# Altium footprint library WR-BHD.PcbLib: 220 footprints (part 3 of 14)
Each footprint in its own frame and in the unit in brackets; x right, y up, seen from the top. Pads: shape width x height; smd on the part's side, far side on the other; paste and mask are expansions set on the pad; w line width, h text height; cw(c..) or ccw(c..) is an arc to the next point about the centre after c.
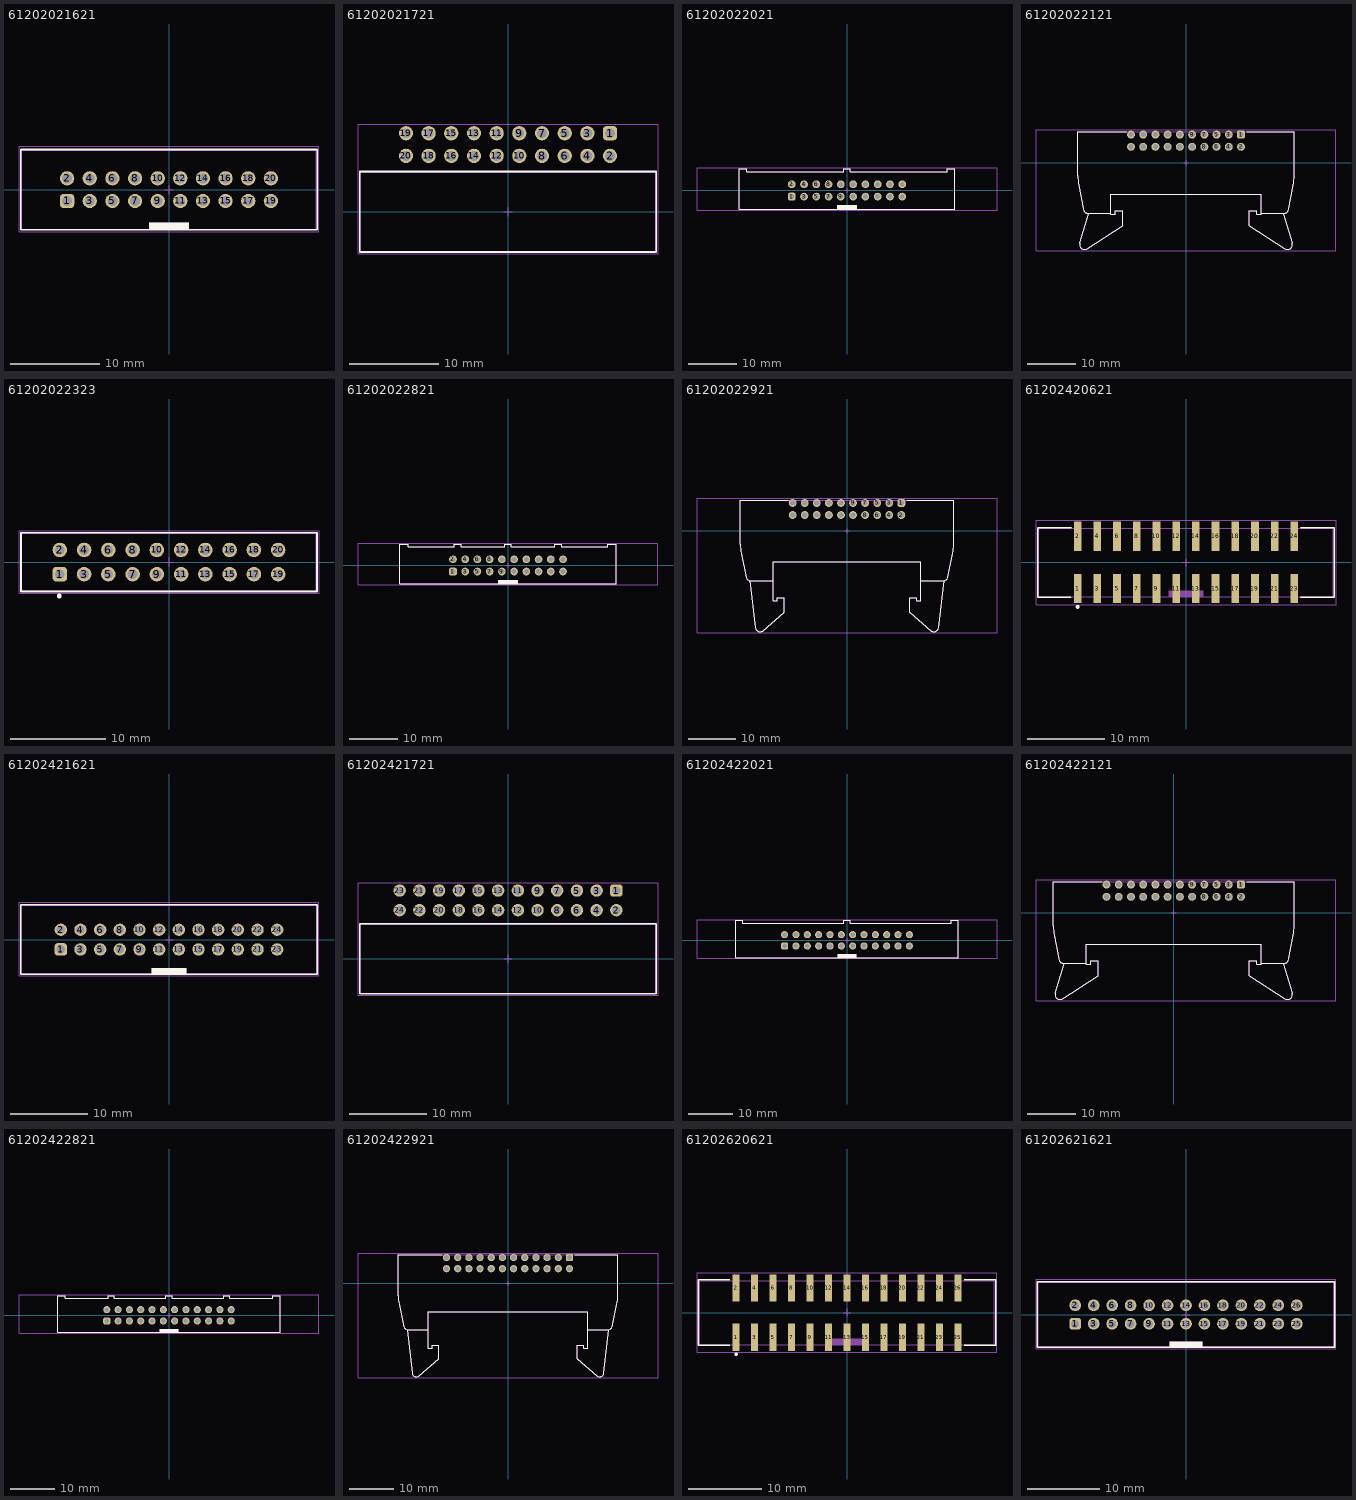
[diagram p2: the footprints below, top view; thin cyan lines are the x and y axes]

## 61202021621 [mm] "20 pins, straight, gold plating"
height 9.1
pads (20):
  rrect50% 1.6x1.6 hole 1.1: 1(-11.43,-1.27)
  round 1.6 hole 1.1: 2(-11.43,1.27) 3(-8.89,-1.27) 4(-8.89,1.27) 5(-6.35,-1.27) 6(-6.35,1.27) 7(-3.81,-1.27) 8(-3.81,1.27) 9(-1.27,-1.27) 10(-1.27,1.27) 11(1.27,-1.27) 12(1.27,1.27) 13(3.81,-1.27) 14(3.81,1.27) 15(6.35,-1.27) 16(6.35,1.27) 17(8.89,-1.27) 18(8.89,1.27) 19(11.43,-1.27) 20(11.43,1.27)
Top Overlay:
  rectangle: -2.25,-4.5 2.25,-3.7
  lines w0.2: -16.63,-4.5 -16.63,4.5 16.63,4.5 16.63,-4.5 -16.63,-4.5
Top Assembly:
  rectangle: -2.25,-4.425 2.25,-3.7
  lines w0.1: -16.53,-4.425 16.53,-4.425 16.53,4.425 -16.53,4.425 -16.53,-4.425
Top Designator:
  text ".Designator" at -3.647,-0.357 h1
Top 3D Body:
  rectangle: -2.25,-4.425 2.25,-3.7
  lines w0.1: -16.53,-4.425 -16.53,4.425 16.53,4.425 16.53,-4.425 -16.53,-4.425
Top Courtyard:
  lines w0.05: -16.83,-4.7 -16.83,4.85 16.83,4.85 16.83,-4.7 -16.83,-4.7
Top Component Center:
  lines w0.1: -0.5,0 0.5,0 ; 0,-0.5 0,0.5
3D body "61202021621.stp": height 9.13, standoff -2.98, extent -16.53,-4.425 16.53,4.75

## 61202021721 [mm] "20 pins, right angled, gold plating"
height 9.1
pads (20):
  rrect50% 1.6x1.6 hole 1.1: 1(11.43,8.805)
  round 1.6 hole 1.1: 2(11.43,6.265) 3(8.89,8.805) 4(8.89,6.265) 5(6.35,8.805) 6(6.35,6.265) 7(3.81,8.805) 8(3.81,6.265) 9(1.27,8.805) 10(1.27,6.265) 11(-1.27,8.805) 12(-1.27,6.265) 13(-3.81,8.805) 14(-3.81,6.265) 15(-6.35,8.805) 16(-6.35,6.265) 17(-8.89,8.805) 18(-8.89,6.265) 19(-11.43,8.805) 20(-11.43,6.265)
Top Overlay:
  lines w0.2: -16.605,-4.5 16.605,-4.5 16.605,4.5 -16.605,4.5 -16.605,-4.5
Top Assembly:
  lines w0.1: -16.53,-4.425 16.53,-4.425 16.53,4.425 -16.53,4.425 -16.53,-4.425
Top Designator:
  text ".Designator" at -3.647,-0.357 h1
Top 3D Body:
  lines w0.1: -16.53,-4.425 -16.53,4.425 16.53,4.425 16.53,-4.425 -16.53,-4.425
Top Courtyard:
  lines w0.05: -16.805,-4.7 -16.805,9.805 16.805,9.805 16.805,-4.7 -16.805,-4.7
Top Component Center:
  lines w0.1: -0.5,0 0.5,0 ; 0,-0.5 0,0.5
3D body "61202021721.stp": height 9.23, standoff -2.88, extent -16.53,-4.425 16.53,9.125

## 61202022021 [mm] "20 pins, straight, short lever, gold plating"
height 24.5
pads (20):
  rrect50% 1.6x1.6 hole 1.02: 1(-11.43,-1.27)
  round 1.6 hole 1.02: 2(-11.43,1.27) 3(-8.89,-1.27) 4(-8.89,1.27) 5(-6.35,-1.27) 6(-6.35,1.27) 7(-3.81,-1.27) 8(-3.81,1.27) 9(-1.27,-1.27) 10(-1.27,1.27) 11(1.27,-1.27) 12(1.27,1.27) 13(3.81,-1.27) 14(3.81,1.27) 15(6.35,-1.27) 16(6.35,1.27) 17(8.89,-1.27) 18(8.89,1.27) 19(11.43,-1.27) 20(11.43,1.27)
Top Overlay:
  rectangle: -2.1,-3.85 2.1,-3.05
  lines w0.2: -0.7,4.45 -0.7,3.85 -20.8,3.85 -20.8,4.45 -22.35,4.45 -22.35,-3.85 22.35,-3.85 22.35,4.45 20.8,4.45 20.8,3.85 0.7,3.85 0.7,4.45 -0.7,4.45 ; -0.7,4.45 -0.7,4.45
Top Assembly:
  rectangle: -2.1,-3.85 2.1,-3.05
  lines w0.1: -0.7,4.45 0.7,4.45 0.7,3.85 20.8,3.85 20.8,4.45 22.35,4.45 22.35,-3.85 -22.35,-3.85 -22.35,4.45 -20.8,4.45 -20.8,3.85 -0.7,3.85 -0.7,4.45 ; -0.7,4.45 -0.7,4.45
Top Designator:
  text ".Designator" at -3.647,-0.357 h1
Top 3D Body:
  rectangle: -2.1,-3.85 2.1,-3.05
  lines w0.1: -0.7,4.45 -0.7,3.85 -20.8,3.85 -20.8,4.45 -22.35,4.45 -22.35,-3.85 22.35,-3.85 22.35,4.45 20.8,4.45 20.8,3.85 0.7,3.85 0.7,4.45 -0.7,4.45 ; -0.7,4.45 -0.7,4.45
Top Courtyard:
  lines w0.05: -31.05,-4.05 31.05,-4.05 31.05,4.65 -31.05,4.65 -31.05,-4.05
Top Component Center:
  lines w0.1: -0.5,0 0.5,0 ; 0,-0.5 0,0.5
3D body "61202022021.stp": height 24.55, standoff -3.35, extent -22.449,-3.849 22.451,4.451

## 61202022121 [mm] "20 pins, right angeled, short lever, gold plating"
height 8.3
pads (20):
  rrect50% 1.65x1.65 hole 1.1: 1(11.43,5.88)
  round 1.65 hole 1.1: 2(11.43,3.34) 3(8.89,5.88) 4(8.89,3.34) 5(6.35,5.88) 6(6.35,3.34) 7(3.81,5.88) 8(3.81,3.34) 9(1.27,5.88) 10(1.27,3.34) 11(-1.27,5.88) 12(-1.27,3.34) 13(-3.81,5.88) 14(-3.81,3.34) 15(-6.35,5.88) 16(-6.35,3.34) 17(-8.89,5.88) 18(-8.89,3.34) 19(-11.43,5.88) 20(-11.43,3.34)
Top Overlay:
  lines w0.2: -21.314,-9.501 -22.256,-4.611 cw(c-12.45,-2.65) -22.45,-2.65 -22.45,6.5 -12.35,6.5 ; -21.31,-9.5 ccw(c-20.31,-9.5) -20.31,-10.5 ; -20.405,-10.5 -15.65,-10.5 ; -20.224,-10.601 -22.057,-16.691 ccw(c-21.1,-16.98) -20.55,-17.815 -13.15,-13.08 -13.15,-9.98 -14.65,-9.98 -14.65,-10.69 -15.65,-10.69 -15.65,-6.5 15.65,-6.5 15.65,-10.69 14.65,-10.69 14.65,-9.98 13.15,-9.98 13.15,-13.08 20.55,-17.816 ccw(c21.1,-16.98) 22.057,-16.691 20.224,-10.601 ; 12.6,6.5 22.45,6.5 22.45,-2.65 cw(c12.45,-2.65) 22.256,-4.611 21.314,-9.501 ; 15.65,-10.5 20.405,-10.5 ; 20.31,-10.5 ccw(c20.31,-9.5) 21.31,-9.5
Top Assembly:
  lines w0.1: -21.314,-9.501 -22.256,-4.611 cw(c-12.45,-2.65) -22.45,-2.65 -22.45,6.5 22.45,6.5 22.45,-2.65 cw(c12.45,-2.65) 22.256,-4.611 21.314,-9.501 ; -21.31,-9.5 ccw(c-20.31,-9.5) -20.31,-10.5 ; -20.405,-10.5 -15.65,-10.5 ; -20.224,-10.601 -22.057,-16.691 ccw(c-21.1,-16.98) -20.55,-17.815 -13.15,-13.08 -13.15,-9.98 -14.65,-9.98 -14.65,-10.69 -15.65,-10.69 -15.65,-6.5 15.65,-6.5 15.65,-10.69 14.65,-10.69 14.65,-9.98 13.15,-9.98 13.15,-13.08 20.55,-17.816 ccw(c21.1,-16.98) 22.057,-16.691 20.224,-10.601 ; 15.65,-10.5 20.405,-10.5 ; 20.31,-10.5 ccw(c20.31,-9.5) 21.31,-9.5
Top Designator:
  text ".Designator" at -3.647,-0.357 h1
Top 3D Body:
  lines w0.1: -21.314,-9.501 -22.256,-4.611 cw(c-12.45,-2.65) -22.45,-2.65 -22.45,6.5 22.45,6.5 22.45,-2.65 cw(c12.45,-2.65) 22.256,-4.611 21.314,-9.501 ; -21.31,-9.5 ccw(c-20.31,-9.5) -20.31,-10.5 ; -20.405,-10.5 -15.65,-10.5 ; -20.224,-10.601 -22.057,-16.691 ccw(c-21.1,-16.98) -20.55,-17.815 -13.15,-13.08 -13.15,-9.98 -14.65,-9.98 -14.65,-10.69 -15.65,-10.69 -15.65,-6.5 15.65,-6.5 15.65,-10.69 14.65,-10.69 14.65,-9.98 13.15,-9.98 13.15,-13.08 20.55,-17.816 ccw(c21.1,-16.98) 22.057,-16.691 20.224,-10.601 ; 15.65,-10.5 20.405,-10.5 ; 20.31,-10.5 ccw(c20.31,-9.5) 21.31,-9.5
Top Courtyard:
  lines w0.05: -31.15,-18.2 31.15,-18.2 31.15,6.88 -31.15,6.88 -31.15,-18.2
Top Component Center:
  lines w0.1: -0.5,0 0.5,0 ; 0,-0.5 0,0.5
3D body "61202022121.stp": height 8.35, standoff -3.35, extent -22.45,-18 22.45,6.5

## 61202022323 [mm] "20 pins, selective gold plating"
height 7.3
pads (20):
  rrect50% 1.52x1.52 hole 1.02: 1(-11.43,-1.27)
  round 1.52 hole 1.02: 2(-11.43,1.27) 3(-8.89,-1.27) 4(-8.89,1.27) 5(-6.35,-1.27) 6(-6.35,1.27) 7(-3.81,-1.27) 8(-3.81,1.27) 9(-1.27,-1.27) 10(-1.27,1.27) 11(1.27,-1.27) 12(1.27,1.27) 13(3.81,-1.27) 14(3.81,1.27) 15(6.35,-1.27) 16(6.35,1.27) 17(8.89,-1.27) 18(8.89,1.27) 19(11.43,-1.27) 20(11.43,1.27)
Top Overlay:
  circle w0.25: c-11.49,-3.55 r0.125
  lines w0.2: -15.5,-3.075 -15.5,3.075 15.5,3.075 15.5,-3.075 -15.5,-3.075
Top Assembly:
  lines w0.1: -15.425,-3 15.425,-3 15.425,3 -15.425,3 -15.425,-3
Top Designator:
  text ".Designator" at -3.647,-0.357 h1
Top 3D Body:
  lines w0.1: -15.425,-3 -15.425,3 15.425,3 15.425,-3 -15.425,-3
Top Courtyard:
  lines w0.05: -15.7,-3.275 -15.7,3.275 15.7,3.275 15.7,-3.275 -15.7,-3.275
Top Component Center:
  lines w0.1: -0.5,0 0.5,0 ; 0,-0.5 0,0.5
3D body "61202022323.stp": height 9.33, standoff -3.27, extent -15.425,-3 15.425,3

## 61202022821 [mm] "20 pins, straight, long lever, gold plating"
height 28
pads (20):
  rrect50% 1.6x1.6 hole 1.02: 1(-11.43,-1.27)
  round 1.6 hole 1.02: 2(-11.43,1.27) 3(-8.89,-1.27) 4(-8.89,1.27) 5(-6.35,-1.27) 6(-6.35,1.27) 7(-3.81,-1.27) 8(-3.81,1.27) 9(-1.27,-1.27) 10(-1.27,1.27) 11(1.27,-1.27) 12(1.27,1.27) 13(3.81,-1.27) 14(3.81,1.27) 15(6.35,-1.27) 16(6.35,1.27) 17(8.89,-1.27) 18(8.89,1.27) 19(11.43,-1.27) 20(11.43,1.27)
Top Overlay:
  rectangle: -2.1,-3.85 2.1,-3.04
  lines w0.2: -22.45,-3.85 -22.45,4.45 -20.72,4.45 -20.72,3.85 -11.15,3.85 -11.15,4.45 -9.75,4.45 -9.75,3.85 -0.7,3.85 -0.7,4.45 0.7,4.45 0.7,3.85 9.75,3.85 9.75,4.45 11.15,4.45 11.15,3.85 20.72,3.85 20.72,4.45 22.45,4.45 22.45,-3.85 -22.45,-3.85
Top Assembly:
  rectangle: -2.1,-3.85 2.1,-3.04
  lines w0.1: -22.45,-3.85 22.45,-3.85 22.45,4.45 20.72,4.45 20.72,3.85 11.15,3.85 11.15,4.45 9.75,4.45 9.75,3.85 0.7,3.85 0.7,4.45 -0.7,4.45 -0.7,3.85 -9.75,3.85 -9.75,4.45 -11.15,4.45 -11.15,3.85 -20.72,3.85 -20.72,4.45 -22.45,4.45 -22.45,-3.85
Top Designator:
  text ".Designator" at -3.647,-0.357 h1
Top 3D Body:
  rectangle: -2.1,-3.85 2.1,-3.04
  lines w0.1: -22.45,-3.85 -22.45,4.45 -20.72,4.45 -20.72,3.85 -11.15,3.85 -11.15,4.45 -9.75,4.45 -9.75,3.85 -0.7,3.85 -0.7,4.45 0.7,4.45 0.7,3.85 9.75,3.85 9.75,4.45 11.15,4.45 11.15,3.85 20.72,3.85 20.72,4.45 22.45,4.45 22.45,-3.85 -22.45,-3.85
Top Courtyard:
  lines w0.05: -31.15,-4.05 31.15,-4.05 31.15,4.65 -31.15,4.65 -31.15,-4.05
Top Component Center:
  lines w0.1: -0.5,0 0.5,0 ; 0,-0.5 0,0.5
3D body "61202022821 (rev1).stp": height 27.84, standoff -3.35, extent -22.45,-3.86 22.45,4.45

## 61202022921 [mm] "20 pins, right angeled, long lever, gold plating"
height 10.8
pads (20):
  rrect50% 1.65x1.65 hole 1.1: 1(11.43,5.88)
  round 1.65 hole 1.1: 2(11.43,3.34) 3(8.89,5.88) 4(8.89,3.34) 5(6.35,5.88) 6(6.35,3.34) 7(3.81,5.88) 8(3.81,3.34) 9(1.27,5.88) 10(1.27,3.34) 11(-1.27,5.88) 12(-1.27,3.34) 13(-3.81,5.88) 14(-3.81,3.34) 15(-6.35,5.88) 16(-6.35,3.34) 17(-8.89,5.88) 18(-8.89,3.34) 19(-11.43,5.88) 20(-11.43,3.34)
Top Overlay:
  lines w0.2: -22.45,-2.81 -22.45,6.5 -12.4,6.5 ; -22.446,-2.81 ccw(c-12.45,-2.51) -22.204,-4.714 -21.159,-9.884 ; -21.154,-9.883 ccw(c-20.23,-9.5) -20.23,-10.5 -15.55,-10.5 ; -20.414,-10.5 -19.268,-20.372 ccw(c-18.28,-20.22) -17.622,-20.973 -13.151,-17.109 ; -13.15,-17.11 -13.15,-14.01 -14.65,-14.01 -14.65,-14.72 -15.55,-14.72 -15.55,-6.5 15.55,-6.5 15.55,-14.72 14.65,-14.72 14.65,-14.01 13.15,-14.01 13.15,-17.11 ; 12.6,6.5 22.45,6.5 22.45,-2.81 ; 13.151,-17.109 17.622,-20.973 ccw(c18.28,-20.22) 19.268,-20.372 20.414,-10.5 ; 15.55,-10.5 20.23,-10.5 ccw(c20.23,-9.5) 21.154,-9.883 ; 21.159,-9.884 22.204,-4.714 ccw(c12.45,-2.51) 22.446,-2.81
Top Assembly:
  lines w0.1: -22.45,-2.81 -22.45,6.5 22.45,6.5 22.45,-2.81 ; -22.446,-2.81 ccw(c-12.45,-2.51) -22.204,-4.714 -21.159,-9.884 ; -21.154,-9.883 ccw(c-20.23,-9.5) -20.23,-10.5 -15.55,-10.5 ; -20.414,-10.5 -19.268,-20.372 ccw(c-18.28,-20.22) -17.622,-20.973 -13.151,-17.109 ; -13.15,-17.11 -13.15,-14.01 -14.65,-14.01 -14.65,-14.72 -15.55,-14.72 -15.55,-6.5 15.55,-6.5 15.55,-14.72 14.65,-14.72 14.65,-14.01 13.15,-14.01 13.15,-17.11 ; 13.151,-17.109 17.622,-20.973 ccw(c18.28,-20.22) 19.268,-20.372 20.414,-10.5 ; 15.55,-10.5 20.23,-10.5 ccw(c20.23,-9.5) 21.154,-9.883 ; 21.159,-9.884 22.204,-4.714 ccw(c12.45,-2.51) 22.446,-2.81
Top Designator:
  text ".Designator" at -3.647,-0.357 h1
Top 3D Body:
  lines w0.1: -22.45,-2.81 -22.45,6.5 22.45,6.5 22.45,-2.81 ; -22.446,-2.81 ccw(c-12.45,-2.51) -22.204,-4.714 -21.159,-9.884 ; -21.154,-9.883 ccw(c-20.23,-9.5) -20.23,-10.5 -15.55,-10.5 ; -20.414,-10.5 -19.268,-20.372 ccw(c-18.28,-20.22) -17.622,-20.973 -13.151,-17.109 ; -13.15,-17.11 -13.15,-14.01 -14.65,-14.01 -14.65,-14.72 -15.55,-14.72 -15.55,-6.5 15.55,-6.5 15.55,-14.72 14.65,-14.72 14.65,-14.01 13.15,-14.01 13.15,-17.11 ; 13.151,-17.109 17.622,-20.973 ccw(c18.28,-20.22) 19.268,-20.372 20.414,-10.5 ; 15.55,-10.5 20.23,-10.5 ccw(c20.23,-9.5) 21.154,-9.883 ; 21.159,-9.884 22.204,-4.714 ccw(c12.45,-2.51) 22.446,-2.81
Top Courtyard:
  lines w0.05: -31.55,-21.41 -31.55,6.88 31.55,6.88 31.55,-21.41 -31.55,-21.41
Top Component Center:
  lines w0.1: -0.5,0 0.5,0 ; 0,-0.5 0,0.5
3D body "61202022921 (rev1).stp": height 8.35, standoff -2.35, extent -22.45,-21.221 22.45,6.5

## 61202420621 [mm] "24 pins, SMT, straight, gold plating"
height 9.2
pads (24):
  rect 1x3.75 smd: 1(-13.97,-3.375) 2(-13.97,3.375) 3(-11.43,-3.375) 4(-11.43,3.375) 5(-8.89,-3.375) 6(-8.89,3.375) 7(-6.35,-3.375) 8(-6.35,3.375) 9(-3.81,-3.375) 10(-3.81,3.375) 11(-1.27,-3.375) 12(-1.27,3.375) 13(1.27,-3.375) 14(1.27,3.375) 15(3.81,-3.375) 16(3.81,3.375) 17(6.35,-3.375) 18(6.35,3.375) 19(8.89,-3.375) 20(8.89,3.375) 21(11.43,-3.375) 22(11.43,3.375) 23(13.97,-3.375) 24(13.97,3.375)
Top Overlay:
  circle w0.25: c-13.97,-5.725 r0.125
  lines w0.2: -14.86,-4.5 -19.14,-4.5 -19.14,4.5 -14.81,4.5 ; 14.81,-4.5 19.14,-4.5 19.14,4.5 14.81,4.5
Top Assembly:
  rectangle: -2.25,-4.4 2.25,-3.6
  lines w0.1: -18.99,-4.4 18.99,-4.4 18.99,4.4 -18.99,4.4 -18.99,-4.4
Top Designator:
  text ".Designator" at -3.647,-0.357 h1
Top 3D Body:
  rectangle: -2.25,-4.4 2.25,-3.6
  lines w0.1: -18.99,-4.4 -18.99,4.4 18.99,4.4 18.99,-4.4 -18.99,-4.4
Top Courtyard:
  lines w0.05: -19.34,-5.45 -19.34,5.45 19.34,5.45 19.34,-5.45 -19.34,-5.45
Top Component Center:
  lines w0.1: -0.5,0 0.5,0 ; 0,-0.5 0,0.5
3D body "61202420621.stp": height 10.2, standoff 0.01, extent -19.05,-4.75 19.05,4.75

## 61202421621 [mm] "24 pins, straight, gold plating"
height 9.1
pads (24):
  rrect50% 1.6x1.6 hole 1.1: 1(-13.97,-1.27)
  round 1.6 hole 1.1: 2(-13.97,1.27) 3(-11.43,-1.27) 4(-11.43,1.27) 5(-8.89,-1.27) 6(-8.89,1.27) 7(-6.35,-1.27) 8(-6.35,1.27) 9(-3.81,-1.27) 10(-3.81,1.27) 11(-1.27,-1.27) 12(-1.27,1.27) 13(1.27,-1.27) 14(1.27,1.27) 15(3.81,-1.27) 16(3.81,1.27) 17(6.35,-1.27) 18(6.35,1.27) 19(8.89,-1.27) 20(8.89,1.27) 21(11.43,-1.27) 22(11.43,1.27) 23(13.97,-1.27) 24(13.97,1.27)
Top Overlay:
  rectangle: -2.25,-4.5 2.25,-3.7
  lines w0.2: -19.17,-4.5 -19.17,4.5 19.17,4.5 19.17,-4.5 -19.17,-4.5
Top Assembly:
  rectangle: -2.25,-4.425 2.25,-3.7
  lines w0.1: -19.07,-4.425 19.07,-4.425 19.07,4.425 -19.07,4.425 -19.07,-4.425
Top Designator:
  text ".Designator" at -3.647,-0.357 h1
Top 3D Body:
  rectangle: -2.25,-4.425 2.25,-3.7
  lines w0.1: -19.07,-4.425 -19.07,4.425 19.07,4.425 19.07,-4.425 -19.07,-4.425
Top Courtyard:
  lines w0.05: -19.37,-4.7 -19.37,4.85 19.37,4.85 19.37,-4.7 -19.37,-4.7
Top Component Center:
  lines w0.1: -0.5,0 0.5,0 ; 0,-0.5 0,0.5
3D body "61202421621.stp": height 9.13, standoff -2.98, extent -19.07,-4.425 19.07,4.75

## 61202421721 [mm] "24 pins, right angled, gold plating"
height 9.1
pads (24):
  rrect50% 1.6x1.6 hole 1.1: 1(13.97,8.805)
  round 1.6 hole 1.1: 2(13.97,6.265) 3(11.43,8.805) 4(11.43,6.265) 5(8.89,8.805) 6(8.89,6.265) 7(6.35,8.805) 8(6.35,6.265) 9(3.81,8.805) 10(3.81,6.265) 11(1.27,8.805) 12(1.27,6.265) 13(-1.27,8.805) 14(-1.27,6.265) 15(-3.81,8.805) 16(-3.81,6.265) 17(-6.35,8.805) 18(-6.35,6.265) 19(-8.89,8.805) 20(-8.89,6.265) 21(-11.43,8.805) 22(-11.43,6.265) 23(-13.97,8.805) 24(-13.97,6.265)
Top Overlay:
  lines w0.2: -19.145,-4.5 -19.145,4.5 19.145,4.5 19.145,-4.5 -19.145,-4.5
Top Assembly:
  lines w0.1: -19.07,-4.425 -19.07,4.425 19.07,4.425 19.07,-4.425 -19.07,-4.425
Top Designator:
  text ".Designator" at -3.647,-0.357 h1
Top 3D Body:
  lines w0.1: -19.07,-4.425 19.07,-4.425 19.07,4.425 -19.07,4.425 -19.07,-4.425
Top Courtyard:
  lines w0.05: -19.345,-4.7 19.345,-4.7 19.345,9.805 -19.345,9.805 -19.345,-4.7
Top Component Center:
  lines w0.1: -0.5,0 0.5,0 ; 0,-0.5 0,0.5
3D body "61202421721.stp": height 9.23, standoff -2.88, extent -19.07,-4.425 19.07,9.125

## 61202422021 [mm] "24 pins, straight, short lever, gold plating"
height 24.5
pads (24):
  rrect50% 1.6x1.6 hole 1.02: 1(-13.97,-1.27)
  round 1.6 hole 1.02: 2(-13.97,1.27) 3(-11.43,-1.27) 4(-11.43,1.27) 5(-8.89,-1.27) 6(-8.89,1.27) 7(-6.35,-1.27) 8(-6.35,1.27) 9(-3.81,-1.27) 10(-3.81,1.27) 11(-1.27,-1.27) 12(-1.27,1.27) 13(1.27,-1.27) 14(1.27,1.27) 15(3.81,-1.27) 16(3.81,1.27) 17(6.35,-1.27) 18(6.35,1.27) 19(8.89,-1.27) 20(8.89,1.27) 21(11.43,-1.27) 22(11.43,1.27) 23(13.97,-1.27) 24(13.97,1.27)
Top Overlay:
  rectangle: -2.1,-3.85 2.1,-3.05
  lines w0.2: -0.7,4.45 -0.7,3.85 -23.34,3.85 -23.34,4.45 -24.89,4.45 -24.89,-3.85 24.89,-3.85 24.89,4.45 23.34,4.45 23.34,3.85 0.7,3.85 0.7,4.45 -0.7,4.45 ; -0.7,4.45 -0.7,4.45
Top Assembly:
  rectangle: -2.1,-3.85 2.1,-3.05
  lines w0.1: -0.7,4.45 0.7,4.45 0.7,3.85 23.34,3.85 23.34,4.45 24.89,4.45 24.89,-3.85 -24.89,-3.85 -24.89,4.45 -23.34,4.45 -23.34,3.85 -0.7,3.85 -0.7,4.45 ; -0.7,4.45 -0.7,4.45
Top Designator:
  text ".Designator" at -3.647,-0.357 h1
Top 3D Body:
  rectangle: -2.1,-3.85 2.1,-3.05
  lines w0.1: -0.7,4.45 -0.7,3.85 -23.34,3.85 -23.34,4.45 -24.89,4.45 -24.89,-3.85 24.89,-3.85 24.89,4.45 23.34,4.45 23.34,3.85 0.7,3.85 0.7,4.45 -0.7,4.45 ; -0.7,4.45 -0.7,4.45
Top Courtyard:
  lines w0.05: -33.59,-4.05 33.59,-4.05 33.59,4.65 -33.59,4.65 -33.59,-4.05
Top Component Center:
  lines w0.1: -0.5,0 0.5,0 ; 0,-0.5 0,0.5
3D body "61202422021.stp": height 24.55, standoff -3.35, extent -24.989,-3.849 24.991,4.451

## 61202422121 [mm] "24 pins, right angeled, short lever, gold plating"
height 8.3
pads (24):
  rrect50% 1.65x1.65 hole 1.1: 1(13.97,5.88)
  round 1.65 hole 1.1: 2(13.97,3.34) 3(11.43,5.88) 4(11.43,3.34) 5(8.89,5.88) 6(8.89,3.34) 7(6.35,5.88) 8(6.35,3.34) 9(3.81,5.88) 10(3.81,3.34) 11(1.27,5.88) 12(1.27,3.34) 13(-1.27,5.88) 14(-1.27,3.34) 15(-3.81,5.88) 16(-3.81,3.34) 17(-6.35,5.88) 18(-6.35,3.34) 19(-8.89,5.88) 20(-8.89,3.34) 21(-11.43,5.88) 22(-11.43,3.34) 23(-13.97,5.88) 24(-13.97,3.34)
Top Overlay:
  lines w0.2: -23.854,-9.501 -24.796,-4.611 cw(c-14.99,-2.65) -24.99,-2.65 -24.99,6.5 -14.89,6.5 ; -23.85,-9.5 ccw(c-22.85,-9.5) -22.85,-10.5 ; -22.945,-10.5 -18.19,-10.5 ; -22.764,-10.601 -24.597,-16.691 ccw(c-23.64,-16.98) -23.09,-17.815 -15.69,-13.08 -15.69,-9.98 -17.19,-9.98 -17.19,-10.69 -18.19,-10.69 -18.19,-6.5 18.19,-6.5 18.19,-10.69 17.19,-10.69 17.19,-9.98 15.69,-9.98 15.69,-13.08 23.09,-17.816 ccw(c23.64,-16.98) 24.597,-16.691 22.764,-10.601 ; 15.14,6.5 24.99,6.5 24.99,-2.65 cw(c14.99,-2.65) 24.796,-4.611 23.854,-9.501 ; 18.19,-10.5 22.945,-10.5 ; 22.85,-10.5 ccw(c22.85,-9.5) 23.85,-9.5
Top Assembly:
  lines w0.1: -23.854,-9.501 -24.796,-4.611 cw(c-14.99,-2.65) -24.99,-2.65 -24.99,6.5 24.99,6.5 24.99,-2.65 cw(c14.99,-2.65) 24.796,-4.611 23.854,-9.501 ; -23.85,-9.5 ccw(c-22.85,-9.5) -22.85,-10.5 ; -22.945,-10.5 -18.19,-10.5 ; -22.764,-10.601 -24.597,-16.691 ccw(c-23.64,-16.98) -23.09,-17.815 -15.69,-13.08 -15.69,-9.98 -17.19,-9.98 -17.19,-10.69 -18.19,-10.69 -18.19,-6.5 18.19,-6.5 18.19,-10.69 17.19,-10.69 17.19,-9.98 15.69,-9.98 15.69,-13.08 23.09,-17.816 ccw(c23.64,-16.98) 24.597,-16.691 22.764,-10.601 ; 18.19,-10.5 22.945,-10.5 ; 22.85,-10.5 ccw(c22.85,-9.5) 23.85,-9.5
Top Designator:
  text ".Designator" at -3.647,-0.357 h1
Top 3D Body:
  lines w0.1: -23.854,-9.501 -24.796,-4.611 cw(c-14.99,-2.65) -24.99,-2.65 -24.99,6.5 24.99,6.5 24.99,-2.65 cw(c14.99,-2.65) 24.796,-4.611 23.854,-9.501 ; -23.85,-9.5 ccw(c-22.85,-9.5) -22.85,-10.5 ; -22.945,-10.5 -18.19,-10.5 ; -22.764,-10.601 -24.597,-16.691 ccw(c-23.64,-16.98) -23.09,-17.815 -15.69,-13.08 -15.69,-9.98 -17.19,-9.98 -17.19,-10.69 -18.19,-10.69 -18.19,-6.5 18.19,-6.5 18.19,-10.69 17.19,-10.69 17.19,-9.98 15.69,-9.98 15.69,-13.08 23.09,-17.816 ccw(c23.64,-16.98) 24.597,-16.691 22.764,-10.601 ; 18.19,-10.5 22.945,-10.5 ; 22.85,-10.5 ccw(c22.85,-9.5) 23.85,-9.5
Top Courtyard:
  lines w0.05: -28.61,-18.2 -28.61,6.88 33.69,6.88 33.69,-18.2 -28.61,-18.2
Top Component Center:
  lines w0.1: -0.5,0 0.5,0 ; 0,-0.5 0,0.5
3D body "61202422121.stp": height 8.35, standoff -3.35, extent -24.99,-18 24.99,6.5

## 61202422821 [mm] "24 pins, straight, long lever, gold plating"
height 28
pads (24):
  rrect50% 1.6x1.6 hole 1.02: 1(-13.97,-1.27)
  round 1.6 hole 1.02: 2(-13.97,1.27) 3(-11.43,-1.27) 4(-11.43,1.27) 5(-8.89,-1.27) 6(-8.89,1.27) 7(-6.35,-1.27) 8(-6.35,1.27) 9(-3.81,-1.27) 10(-3.81,1.27) 11(-1.27,-1.27) 12(-1.27,1.27) 13(1.27,-1.27) 14(1.27,1.27) 15(3.81,-1.27) 16(3.81,1.27) 17(6.35,-1.27) 18(6.35,1.27) 19(8.89,-1.27) 20(8.89,1.27) 21(11.43,-1.27) 22(11.43,1.27) 23(13.97,-1.27) 24(13.97,1.27)
Top Overlay:
  rectangle: -2.1,-3.85 2.1,-3.04
  lines w0.2: -24.99,-3.85 -24.99,4.45 -23.26,4.45 -23.26,3.85 -13.69,3.85 -13.69,4.45 -12.29,4.45 -12.29,3.85 -0.7,3.85 -0.7,4.45 0.7,4.45 0.7,3.85 12.29,3.85 12.29,4.45 13.69,4.45 13.69,3.85 23.26,3.85 23.26,4.45 24.99,4.45 24.99,-3.85 -24.99,-3.85
Top Assembly:
  rectangle: -2.1,-3.85 2.1,-3.04
  lines w0.1: -24.99,-3.85 24.99,-3.85 24.99,4.45 23.26,4.45 23.26,3.85 13.69,3.85 13.69,4.45 12.29,4.45 12.29,3.85 0.7,3.85 0.7,4.45 -0.7,4.45 -0.7,3.85 -12.29,3.85 -12.29,4.45 -13.69,4.45 -13.69,3.85 -23.26,3.85 -23.26,4.45 -24.99,4.45 -24.99,-3.85
Top Designator:
  text ".Designator" at -3.647,-0.357 h1
Top 3D Body:
  rectangle: -2.1,-3.85 2.1,-3.04
  lines w0.1: -24.99,-3.85 -24.99,4.45 -23.26,4.45 -23.26,3.85 -13.69,3.85 -13.69,4.45 -12.29,4.45 -12.29,3.85 -0.7,3.85 -0.7,4.45 0.7,4.45 0.7,3.85 12.29,3.85 12.29,4.45 13.69,4.45 13.69,3.85 23.26,3.85 23.26,4.45 24.99,4.45 24.99,-3.85 -24.99,-3.85
Top Courtyard:
  lines w0.05: -33.69,-4.05 -33.69,4.65 33.69,4.65 33.69,-4.05 -33.69,-4.05
Top Component Center:
  lines w0.1: -0.5,0 0.5,0 ; 0,-0.5 0,0.5
3D body "61202422821 (rev1).stp": height 27.84, standoff -3.35, extent -24.99,-3.86 24.99,4.45

## 61202422921 [mm] "24 pins, right angeled, long lever, gold plating"
height 10.8
pads (24):
  rrect50% 1.65x1.65 hole 1.1: 1(13.97,5.88)
  round 1.65 hole 1.1: 2(13.97,3.34) 3(11.43,5.88) 4(11.43,3.34) 5(8.89,5.88) 6(8.89,3.34) 7(6.35,5.88) 8(6.35,3.34) 9(3.81,5.88) 10(3.81,3.34) 11(1.27,5.88) 12(1.27,3.34) 13(-1.27,5.88) 14(-1.27,3.34) 15(-3.81,5.88) 16(-3.81,3.34) 17(-6.35,5.88) 18(-6.35,3.34) 19(-8.89,5.88) 20(-8.89,3.34) 21(-11.43,5.88) 22(-11.43,3.34) 23(-13.97,5.88) 24(-13.97,3.34)
Top Overlay:
  lines w0.2: -24.99,-2.81 -24.99,6.5 -14.94,6.5 ; -24.985,-2.81 ccw(c-14.99,-2.51) -24.744,-4.714 -23.699,-9.884 ; -23.693,-9.883 ccw(c-22.77,-9.5) -22.77,-10.5 -18.09,-10.5 ; -22.954,-10.5 -21.808,-20.372 ccw(c-20.82,-20.22) -20.162,-20.973 -15.691,-17.109 ; -15.69,-17.11 -15.69,-14.01 -17.19,-14.01 -17.19,-14.72 -18.09,-14.72 -18.09,-6.5 18.09,-6.5 18.09,-14.72 17.19,-14.72 17.19,-14.01 15.69,-14.01 15.69,-17.11 ; 15.14,6.5 24.99,6.5 24.99,-2.81 ; 15.691,-17.109 20.163,-20.973 ccw(c20.82,-20.22) 21.808,-20.372 22.954,-10.5 ; 18.09,-10.5 22.77,-10.5 ccw(c22.77,-9.5) 23.694,-9.883 ; 23.699,-9.884 24.744,-4.714 ccw(c14.99,-2.51) 24.986,-2.81
Top Assembly:
  lines w0.1: -24.99,-2.81 -24.99,6.5 24.99,6.5 24.99,-2.81 ; -24.985,-2.81 ccw(c-14.99,-2.51) -24.744,-4.714 -23.699,-9.884 ; -23.693,-9.883 ccw(c-22.77,-9.5) -22.77,-10.5 -18.09,-10.5 ; -22.954,-10.5 -21.808,-20.372 ccw(c-20.82,-20.22) -20.162,-20.973 -15.691,-17.109 ; -15.69,-17.11 -15.69,-14.01 -17.19,-14.01 -17.19,-14.72 -18.09,-14.72 -18.09,-6.5 18.09,-6.5 18.09,-14.72 17.19,-14.72 17.19,-14.01 15.69,-14.01 15.69,-17.11 ; 15.691,-17.109 20.163,-20.973 ccw(c20.82,-20.22) 21.808,-20.372 22.954,-10.5 ; 18.09,-10.5 22.77,-10.5 ccw(c22.77,-9.5) 23.694,-9.883 ; 23.699,-9.884 24.744,-4.714 ccw(c14.99,-2.51) 24.986,-2.81
Top Designator:
  text ".Designator" at -3.647,-0.357 h1
Top 3D Body:
  lines w0.1: -24.99,-2.81 -24.99,6.5 24.99,6.5 24.99,-2.81 ; -24.985,-2.81 ccw(c-14.99,-2.51) -24.744,-4.714 -23.699,-9.884 ; -23.693,-9.883 ccw(c-22.77,-9.5) -22.77,-10.5 -18.09,-10.5 ; -22.954,-10.5 -21.808,-20.372 ccw(c-20.82,-20.22) -20.162,-20.973 -15.691,-17.109 ; -15.69,-17.11 -15.69,-14.01 -17.19,-14.01 -17.19,-14.72 -18.09,-14.72 -18.09,-6.5 18.09,-6.5 18.09,-14.72 17.19,-14.72 17.19,-14.01 15.69,-14.01 15.69,-17.11 ; 15.691,-17.109 20.163,-20.973 ccw(c20.82,-20.22) 21.808,-20.372 22.954,-10.5 ; 18.09,-10.5 22.77,-10.5 ccw(c22.77,-9.5) 23.694,-9.883 ; 23.699,-9.884 24.744,-4.714 ccw(c14.99,-2.51) 24.986,-2.81
Top Courtyard:
  lines w0.05: -34.09,-21.41 -34.09,6.88 34.09,6.88 34.09,-21.41 -34.09,-21.41
Top Component Center:
  lines w0.1: -0.5,0 0.5,0 ; 0,-0.5 0,0.5
3D body "61202422921 (rev1).stp": height 8.35, standoff -2.35, extent -24.99,-21.221 24.99,6.5

## 61202620621 [mm] "26 pins, SMT, straight, gold plating"
height 9.2
pads (26):
  rect 1x3.75 smd: 1(-15.24,-3.375) 2(-15.24,3.375) 3(-12.7,-3.375) 4(-12.7,3.375) 5(-10.16,-3.375) 6(-10.16,3.375) 7(-7.62,-3.375) 8(-7.62,3.375) 9(-5.08,-3.375) 10(-5.08,3.375) 11(-2.54,-3.375) 12(-2.54,3.375) 13(0,-3.375) 14(0,3.375) 15(2.54,-3.375) 16(2.54,3.375) 17(5.08,-3.375) 18(5.08,3.375) 19(7.62,-3.375) 20(7.62,3.375) 21(10.16,-3.375) 22(10.16,3.375) 23(12.7,-3.375) 24(12.7,3.375) 25(15.24,-3.375) 26(15.24,3.375)
Top Overlay:
  circle w0.25: c-15.24,-5.725 r0.125
  lines w0.2: -16.13,-4.5 -20.41,-4.5 -20.41,4.5 -16.08,4.5 ; 16.08,-4.5 20.41,-4.5 20.41,4.5 16.08,4.5
Top Assembly:
  rectangle: -2.25,-4.4 2.25,-3.6
  lines w0.1: -20.26,-4.4 -20.26,4.4 20.26,4.4 20.26,-4.4 -20.26,-4.4
Top Designator:
  text ".Designator" at -3.647,-0.357 h1
Top 3D Body:
  rectangle: -2.25,-4.4 2.25,-3.6
  lines w0.1: -20.26,-4.4 20.26,-4.4 20.26,4.4 -20.26,4.4 -20.26,-4.4
Top Courtyard:
  lines w0.05: -20.61,-5.45 20.61,-5.45 20.61,5.45 -20.61,5.45 -20.61,-5.45
Top Component Center:
  lines w0.1: -0.5,0 0.5,0 ; 0,-0.5 0,0.5
3D body "61202620621.stp": height 10.2, standoff 0.01, extent -20.32,-4.75 20.32,4.75

## 61202621621 [mm] "26 pins, straight, gold plating"
height 9.1
pads (26):
  rrect50% 1.6x1.6 hole 1.1: 1(-15.24,-1.27)
  round 1.6 hole 1.1: 2(-15.24,1.27) 3(-12.7,-1.27) 4(-12.7,1.27) 5(-10.16,-1.27) 6(-10.16,1.27) 7(-7.62,-1.27) 8(-7.62,1.27) 9(-5.08,-1.27) 10(-5.08,1.27) 11(-2.54,-1.27) 12(-2.54,1.27) 13(0,-1.27) 14(0,1.27) 15(2.54,-1.27) 16(2.54,1.27) 17(5.08,-1.27) 18(5.08,1.27) 19(7.62,-1.27) 20(7.62,1.27) 21(10.16,-1.27) 22(10.16,1.27) 23(12.7,-1.27) 24(12.7,1.27) 25(15.24,-1.27) 26(15.24,1.27)
Top Overlay:
  rectangle: -2.25,-4.5 2.25,-3.7
  lines w0.2: -20.44,-4.5 20.44,-4.5 20.44,4.5 -20.44,4.5 -20.44,-4.5
Top Assembly:
  rectangle: -2.25,-4.425 2.25,-3.7
  lines w0.1: -20.34,-4.425 -20.34,4.425 20.34,4.425 20.34,-4.425 -20.34,-4.425
Top Designator:
  text ".Designator" at -3.647,-0.357 h1
Top 3D Body:
  rectangle: -2.25,-4.425 2.25,-3.7
  lines w0.1: -20.34,-4.425 20.34,-4.425 20.34,4.425 -20.34,4.425 -20.34,-4.425
Top Courtyard:
  lines w0.05: -20.64,-4.7 20.64,-4.7 20.64,4.85 -20.64,4.85 -20.64,-4.7
Top Component Center:
  lines w0.1: -0.5,0 0.5,0 ; 0,-0.5 0,0.5
3D body "61202621621.stp": height 9.13, standoff -2.98, extent -20.34,-4.425 20.34,4.75